# Altium schematic symbol library clusterhead.SchLib: 48 symbols
Pins are listed as number, name and electrical type; pins without a type are passive.

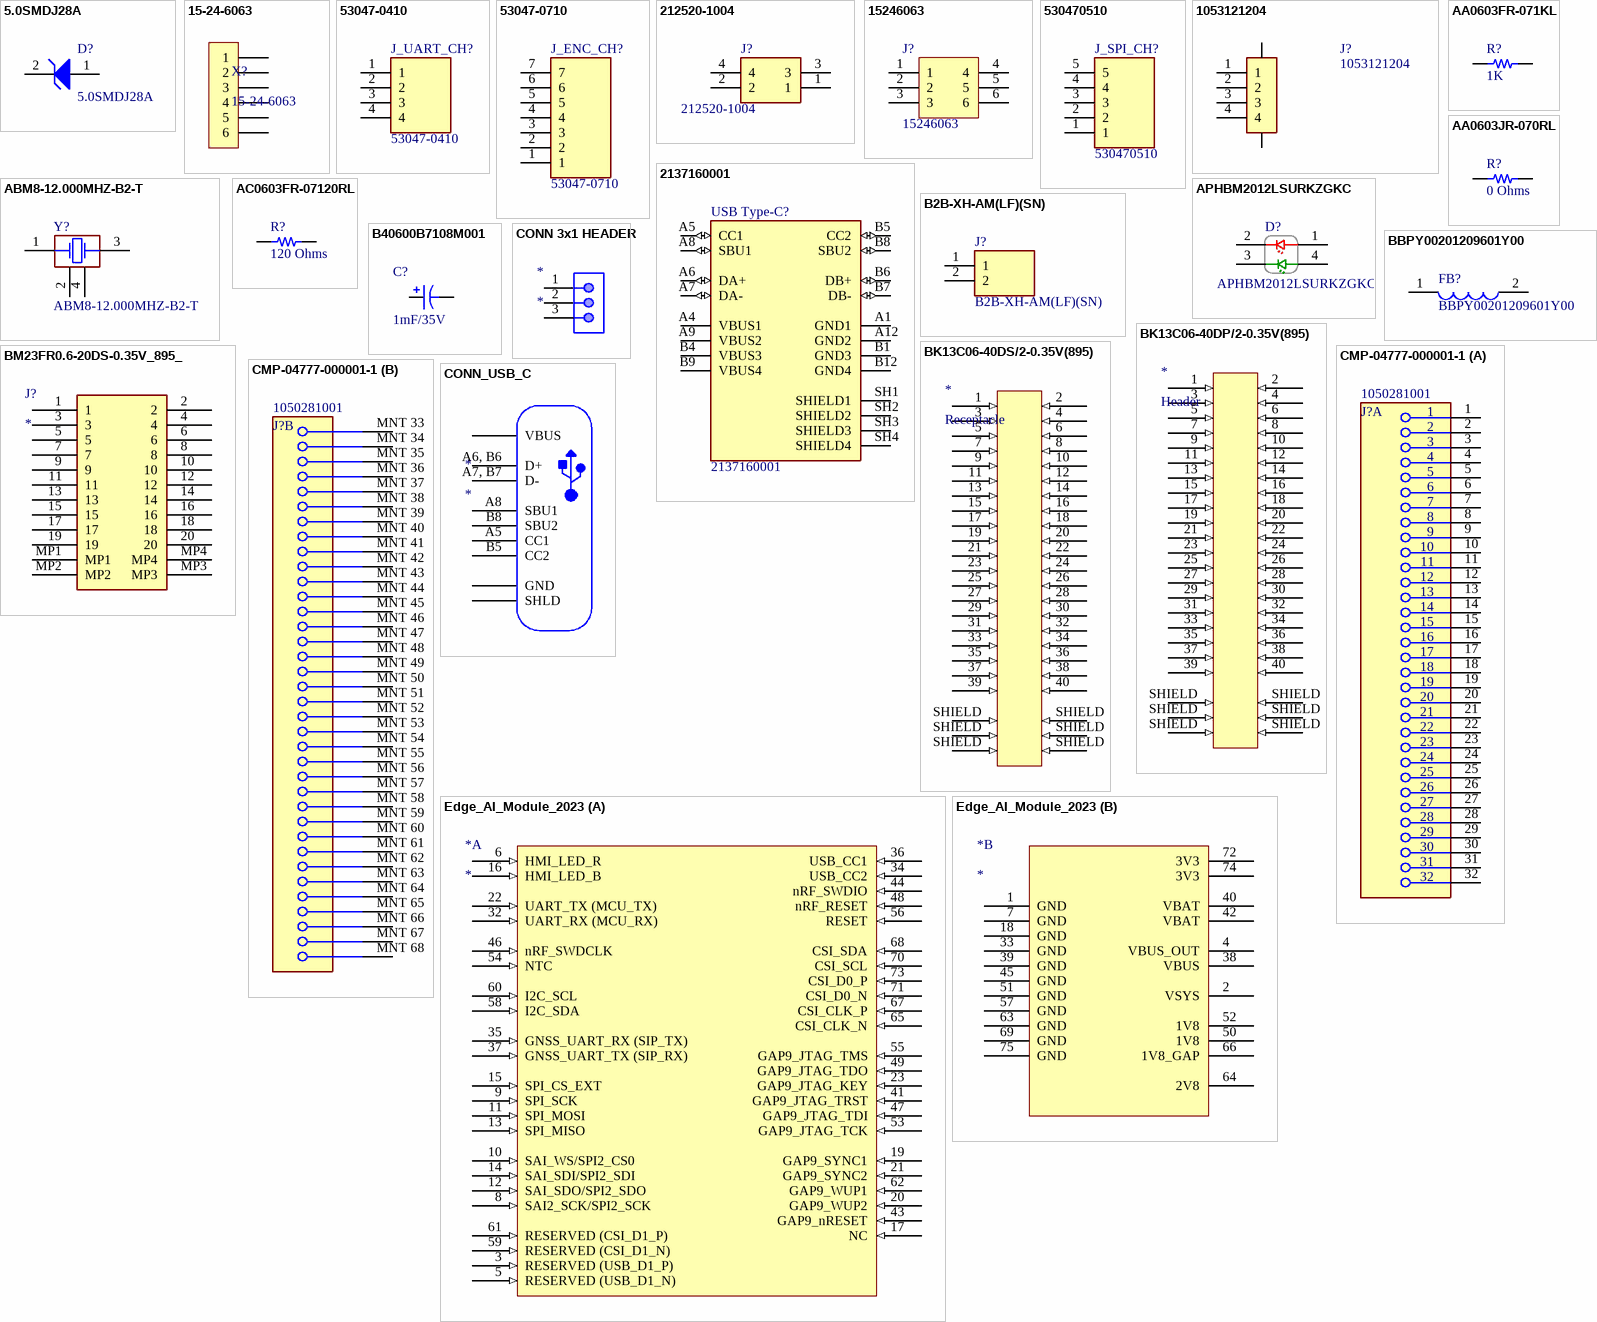
[diagram p0: symbols 5.0SMDJ28A to Edge_AI_Module_2023]

## 5.0SMDJ28A
designator D?
5.0SMDJ Series 5 kW 28 V Uni-Directional Surface Mount TVS Diode - DO-214AB; Manufacturer: Littelfuse; ComponentLink1URL: https://datasheet.ciiva.com/15143/getdatasheetpartid-185167-15143888.pdf?src-supplier=Verical; ComponentLink1Description: https://datasheet.ciiva.com/15143/getdatasheetpartid-185167-15143888.pdf?src-supplier=Verical; ComponentLink2URL: https://datasheet.ciiva.com/332/littelfuse-tvs-diode-5-0smdj-datasheet-pdf-332914.pdf?src-supplier=Digikey; ComponentLink2Description: https://datasheet.ciiva.com/332/littelfuse-tvs-diode-5-0smdj-datasheet-pdf-332914.pdf?src-supplier=Digikey; ComponentLink3URL: https://datasheet.ciiva.com/332/littelfuse-tvs-diode-5-0smdj-datasheet-pdf-332915.pdf?src-supplier=Digikey; ComponentLink3Description: https://datasheet.ciiva.com/332/littelfuse-tvs-diode-5-0smdj-datasheet-pdf-332915.pdf?src-supplier=Digikey; ComponentLink4URL: https://datasheet.ciiva.com/332/littelfuse-tvs-diode-5-0smdj-datasheet-pdf-332916.pdf?src-supplier=Digikey; ComponentLink4Description: https://datasheet.ciiva.com/332/littelfuse-tvs-diode-5-0smdj-datasheet-pdf-332916.pdf?src-supplier=Digikey; Supplier: Digikey; Supplier Part Number: 5.0SMDJ28ADKR-ND; Manufacturer Part Number: 5.0SMDJ28A; RoHS: Yes; Category: TVS Diodes; Stock: 6790; Pricing: 1=1.65, 10=1.37, 100=1.0902, 500=0.92246, 1000=0.78269 (USD)
footprint DO-214AB,SMC (DO-214AB)
pins: 1 A, 2 K

## 15-24-6063
designator X?
Conn Power HDR 6 POS 4.2mm Solder RA Thru-Hole 6 Terminal 1 Port Mini-Fit® BMI Frame; Manufacturer: Molex; Supplier: Digikey; Supplier Part Number: WM13414-ND; Manufacturer Part Number: 15-24-6063; RoHS: Yes; Category: Headers and Wire Housings; Stock: 3777; Pricing: 1=3.1, 10=2.728, 100=2.17, 2720=1.67397, 5440=1.61197 (USD); ComponentLink1URL: https://datasheet.ciiva.com/6814/015246180-sd-6814098.pdf?src-supplier=Digikey; ComponentLink1Description: https://datasheet.ciiva.com/6814/015246180-sd-6814098.pdf?src-supplier=Digikey; ComponentLink2URL: https://datasheet.ciiva.com/36533/88630015246063-pcb-headers-36533167.pdf?src-supplier=Onlinecomponents.com; ComponentLink2Description: https://datasheet.ciiva.com/36533/88630015246063-pcb-headers-36533167.pdf?src-supplier=Onlinecomponents.com; ComponentLink3URL: https://datasheet.ciiva.com/3117/0015246063-pcb-headers-3117083.pdf?src-supplier=Avnet; ComponentLink3Description: https://datasheet.ciiva.com/3117/0015246063-pcb-headers-3117083.pdf?src-supplier=Avnet
footprint MOLEX_15246063
pins: 1, 2, 3, 4, 5, 6

## 53047-0410
designator J_UART_CH?
Connector; Manufacturer_Name: Molex; Datasheet Link: https://www.molex.com/pdm_docs/sd/530470410_sd.pdf; Height: 4.4mm; Manufacturer_Part_Number: 53047-0410; Mouser Part Number: 538-53047-0410; Mouser Price/Stock: https://www.mouser.co.uk/ProductDetail/Molex/53047-0410?qs=DcEdecHHM4i8IPBxVAuJtg%3D%3D
footprint 530470410
pins: 1, 2, 3, 4

## 53047-0710
designator J_ENC_CH?
Connector; Manufacturer_Name: Molex; Datasheet Link: https://componentsearchengine.com/Datasheets/2/53047-0710.pdf; Height: 4.4mm; Manufacturer_Part_Number: 53047-0710; Mouser Part Number: 538-53047-0710; Mouser Price/Stock: https://www.mouser.co.uk/ProductDetail/Molex/53047-0710?qs=359VwiUTsp369M2ojInejw%3D%3D
footprint 530470710
pins: 1, 2, 3, 4, 5, 6, 7

## 212520-1004
designator J?
Mini-Fit Max Vertical Header, Dual Row, 4 Circuits, Tin (Sn) Plating, Black; Manufacturer_Name: Molex; Geometry.Height: 13.85mm; Mouser Part Number: 538-212520-1004; Mouser Price/Stock: https://www.mouser.co.uk/ProductDetail/Molex/212520-1004?qs=pUKx8fyJudAc%252BYvk34kRZQ%3D%3D; Manufacturer_Part_Number: 212520-1004; Datasheet Link: https://www.molex.com/pdm_docs/sd/2125201006_sd.pdf; ClassName: DirectConnect
footprint 2125201004
pins: 1, 2, 3, 4

## 15246063
designator J?
Conn Power HDR 6 POS 4.2mm Solder RA Thru-Hole 6 Terminal 1 Port Mini-Fit® BMI Frame; Manufacturer: Molex; Supplier: Digikey; Supplier Part Number: WM13414-ND; Manufacturer Part Number: 15-24-6063; RoHS: Yes; Category: Headers and Wire Housings; Stock: 3219; Pricing: 1=2.18, 10=1.918, 100=1.5346 (USD); ComponentLink1URL: https://datasheet.ciiva.com/6814/015246180-sd-6814098.pdf?src-supplier=Digikey; ComponentLink1Description: https://datasheet.ciiva.com/6814/015246180-sd-6814098.pdf?src-supplier=Digikey; ComponentLink2URL: https://datasheet.ciiva.com/36533/88630015246063-pcb-headers-36533167.pdf?src-supplier=Onlinecomponents.com; ComponentLink2Description: https://datasheet.ciiva.com/36533/88630015246063-pcb-headers-36533167.pdf?src-supplier=Onlinecomponents.com; ComponentLink3URL: https://datasheet.ciiva.com/3117/0015246063-pcb-headers-3117083.pdf?src-supplier=Avnet; ComponentLink3Description: https://datasheet.ciiva.com/3117/0015246063-pcb-headers-3117083.pdf?src-supplier=Avnet
footprint MOLEX_15246063
pins: 1, 2, 3, 4, 5, 6

## 530470510
designator J_SPI_CH?
Connector; Manufacturer_Name: Molex; Datasheet Link: https://www.molex.com/pdm_docs/sd/530470210_sd.pdf; Height: 4.2mm; Manufacturer_Part_Number: 530470510; Arrow Part Number: 530470510; Arrow Price/Stock: https://www.arrow.com/en/products/53047-0510/molex?region=nac
footprint 530470510
pins: 1, 2, 3, 4, 5

## 1053121204
designator J?
Connector; Manufacturer: Molex; Datasheet Link: https://www.molex.com/pdm_docs/sd/1053121104_sd.pdf; Height: 10.51mm; Manufacturer Part Number: 1053121204
footprint 1053121204
pins: 1, 2, 3, 4, P1, P2

## 2137160001
designator USB Type-C?
USB-C (USB TYPE-C) USB 2.0 Receptacle Connector 24 (16+8 Dummy) Position Through Hole, Right Angle; MF: Molex; SnapEDA_Link: https://www.snapeda.com/parts/2137160001/Molex/view-part/?ref=snap; Package: None; Value: *; MP: 2137160001; Check_prices: https://www.snapeda.com/parts/2137160001/Molex/view-part/?ref=eda
footprint MOLEX_2137160001
pins: A1 GND1 (power), A4 VBUS1 (power), A5 CC1 (io), A6 DA+ (io), A7 DA- (io), A8 SBU1 (io), A9 VBUS2 (power), A12 GND2 (power), B1 GND3 (power), B4 VBUS3 (power), B5 CC2 (io), B6 DB+ (io), B7 DB- (io), B8 SBU2 (io), B9 VBUS4 (power), B12 GND4 (power), SH1 SHIELD1, SH2 SHIELD2, SH3 SHIELD3, SH4 SHIELD4

## AA0603FR-071KL
designator R?, comment 1K
RES SMD 1K OHM 1% 1/10W 0603; Part Number: AA0603FR-071KL; Manufacturer: Yageo; Power (Watts): 0.1W, 1/10W; Resistance: 1 kOhms; Temperature Coefficient: ±150ppm/°C; ComponentLink1Description: Datasheet; ComponentLink1URL: https://www.yageo.com/upload/media/product/productsearch/datasheet/rchip/PYu-AA_51_RoHS_L_3.pdf; ComponentLink2Description: DigiKey Link; ComponentLink2URL: https://www.digikey.com/en/products/detail/yageo/AA0603FR-071KL/5888847; Composition: Thick Film; Device Package: 0603 (1608 Metric); Features: Anti-Sulfur, Automotive AEC-Q200, Moisture Resistant; Height - Seated (Max): 0.022" (0.55mm); LastUpdated: 09/02/2024 20:41:42; Lifecycle Status: Active; Minimum Order: 1; Number of Terminations: 2; Operating Temperature: -55°C ~ 155°C; Package / Case: 0603 (1608 Metric); Packaging: TapeAndReel; PartId: 64335; Part Status: Active; Price: 0.01; Ratings: AEC-Q200; Series: AA; Size / Dimension: 0.063" L x 0.031" W (1.60mm x 0.80mm); Supplier 1: DigiKey; Supplier Part Number 1: 13-AA0603FR-071KLCT-ND; Supplier Device Package: 0603; Tolerance: ±1%; Value: 1K
footprint RES 0603_1608 (Chip Resistor, 2-Leads, Body 1.60x0.80mm, IPC Medium Density)
pins: 1, 2

## AA0603JR-070RL
designator R?, comment 0 Ohms
RES SMD 0 OHM JUMPER 1/10W 0603; Part Number: AA0603JR-070RL; Manufacturer: Yageo; Power (Watts): 0.1W, 1/10W; ComponentLink1Description: Datasheet; ComponentLink1URL: https://www.yageo.com/upload/media/product/productsearch/datasheet/rchip/PYu-AA_51_RoHS_L_3.pdf; ComponentLink2Description: DigiKey Link; ComponentLink2URL: https://www.digikey.com/en/products/detail/yageo/AA0603JR-070RL/5889486; Composition: Thick Film; Device Package: 0603 (1608 Metric); Features: Anti-Sulfur, Automotive AEC-Q200, Moisture Resistant; Height - Seated (Max): 0.022" (0.55mm); LastUpdated: 09/02/2024 20:41:41; Lifecycle Status: Active; Minimum Order: 1; Number of Terminations: 2; Operating Temperature: -55°C ~ 155°C; Package / Case: 0603 (1608 Metric); Packaging: TapeAndReel; PartId: 64274; Part Status: Active; Price: 0.01; Ratings: AEC-Q200; Resistance: 0 Ohms; Series: AA; Size / Dimension: 0.063" L x 0.031" W (1.60mm x 0.80mm); Supplier 1: DigiKey; Supplier Part Number 1: 13-AA0603JR-070RLCT-ND; Supplier Device Package: 0603; Tolerance: Jumper; Value: 0 Ohms
footprint RES 0603_1608 (Chip Resistor, 2-Leads, Body 1.60x0.80mm, IPC Medium Density)
pins: 1, 2

## ABM8-12.000MHZ-B2-T
designator Y?
Crystal or Oscillator; Manufacturer_Name: ABRACON; Datasheet Link: https://abracon.com/Resonators/abm8.pdf; Height: 0.8mm; Manufacturer_Part_Number: ABM8-12.000MHZ-B2-T; Mouser Part Number: 815-ABM8-12-B2-T; Mouser Price/Stock: https://www.mouser.co.uk/ProductDetail/ABRACON/ABM8-12.000MHZ-B2-T?qs=hjiqo2PPvpiyy6%252BNWm3IZg%3D%3D; Arrow Part Number: ABM8-12.000MHZ-B2-T; Arrow Price/Stock: https://www.arrow.com/en/products/abm8-12.000mhz-b2-t/abracon?region=nac
footprint ABM810000MHZ12D2W
pins: 1 XTAL_1, 2 GND_1, 3 XTAL_2, 4 GND_2

## AC0603FR-07120RL
designator R?, comment 120 Ohms
RES SMD 120 OHM 1% 1/10W 0603; Part Number: AC0603FR-07120RL; Manufacturer: Yageo; Power (Watts): 0.1W, 1/10W; Temperature Coefficient: ±100ppm/°C; ComponentLink1Description: Datasheet; ComponentLink1URL: https://www.yageo.com/upload/media/product/productsearch/datasheet/rchip/PYu-AC_51_RoHS_L_7.pdf; ComponentLink2Description: DigiKey Link; ComponentLink2URL: https://www.digikey.com/en/products/detail/yageo/AC0603FR-07120RL/5895761; Composition: Thick Film; Device Package: 0603 (1608 Metric); Features: Automotive AEC-Q200, Moisture Resistant; Height - Seated (Max): 0.022" (0.55mm); LastUpdated: 09/02/2024 20:42:47; Lifecycle Status: Active; Minimum Order: 1; Number of Terminations: 2; Operating Temperature: -55°C ~ 155°C; Package / Case: 0603 (1608 Metric); Packaging: CutTape; PartId: 17447; Part Status: Active; Price: 0.01; Ratings: AEC-Q200; Resistance: 120 Ohms; Series: AC; Size / Dimension: 0.063" L x 0.031" W (1.60mm x 0.80mm); Supplier 1: DigiKey; Supplier Part Number 1: YAG3563CT-ND; Supplier Device Package: 0603; Tolerance: ±1%; Value: 120 Ohms
footprint RES 0603_1608
pins: 1, 2

## APHBM2012LSURKZGKC
designator D?
LED; Manufacturer_Name: Kingbright; Datasheet Link: http://www.kingbrightusa.com/images/catalog/SPEC/APHBM2012LSURKZGKC.pdf; Manufacturer_Part_Number: APHBM2012LSURKZGKC; Mouser Part Number: 604-APHBM2012LSURKZG; Mouser Price/Stock: https://www.mouser.co.uk/ProductDetail/Kingbright/APHBM2012LSURKZGKC?qs=ZqXcJfGlKsiK10t3sE%252BJSA%3D%3D; Arrow Part Number: APHBM2012LSURKZGKC; Arrow Price/Stock: https://www.arrow.com/en/products/aphbm2012lsurkzgkc/kingbright?region=nac
footprint KPHBM2012QBDCGKC
pins: 1 A_RED, 2 K_RED, 3 K_GREEN, 4 A_GREEN

## B2B-XH-AM(LF)(SN)
designator J?
Connector; Manufacture: JST; Datasheet Link: https://www.jst-mfg.com/product/pdf/eng/eXH.pdf; Height: 7mm; Manufacturer Part Number: B2B-XH-AM(LF)(SN); Arrow Part Number: B2B-XH-AM(LF)(SN); Arrow Price/Stock: https://www.arrow.com/en/products/b2b-xh-am-lf-sn/jst-manufacturing?region=europe
footprint B2BXHAMLFSN
pins: 1, 2

## B40600B7108M001
designator C?, comment 1mF/35V
Hybrid Polymer Capacitors, 1000µF/35V DC, 16mm dia x 25mm length; Manufacturer: TDK EPCOS; MP: B40600B7108M001; Value: 1000uF; MF: EPCOS - TDK Electronics; SnapEDA_Link: https://www.snapeda.com/parts/B40600B7108M001/TDK/view-part/?ref=snap; Purchase-URL: https://pricing.snapeda.com/search/part/B40600B7108M001/?ref=eda; Check_prices: https://www.snapeda.com/parts/B40600B7108M001/TDK/view-part/?ref=eda; Digi-Key_Part_Number: 495-B40600B7108M001-ND; Package: AXIAL-2 TDK; Supplier: Digikey; Supplier Part Number: 495-B40600B7108M001-ND; Manufacturer Part Number: B40600B7108M001; RoHS: Yes; Category: Polymer Capacitors; Stock: 816; Pricing: 1=5.06, 10=4.354, 50=3.9488, 180=3.26022, 540=2.835, 1080=2.8125 (USD); Length: 25mm
footprint CAP_B40600B7108M001
pins: N, P

## BBPY00201209601Y00
designator FB?
Ferrite Bead; Manufacturer_Name: Pulse Electronics; Datasheet Link: https://www.yageo.com/upload/media/product/productsearch/datasheet/inductor/BBPY_Series.pdf; Height: 1.1mm; Manufacturer_Part_Number: BBPY00201209601Y00; Mouser Part Number: 603-BBPY201209601Y00; Mouser Price/Stock: https://www.mouser.co.uk/ProductDetail/Pulse-Electronics/BBPY00201209601Y00?qs=DRkmTr78QATKA%252B4%252B6OXqRw%3D%3D
footprint BEADC2012X110N
pins: 1, 2

## BK13C06-40DP/2-0.35V(895)
designator *, comment Header
footprint BK13C06-40DP/2-0.35V(895)
pins: 1 (in), 2 (in), 3 (in), 4 (in), 5 (in), 6 (in), 7 (in), 8 (in), 9 (in), 10 (in), 11 (in), 12 (in), 13 (in), 14 (in), 15 (in), 16 (in), 17 (in), 18 (in), 19 (in), 20 (in), 21 (in), 22 (in), 23 (in), 24 (in), 25 (in), 26 (in), 27 (in), 28 (in), 29 (in), 30 (in), 31 (in), 32 (in), 33 (in), 34 (in), 35 (in), 36 (in), 37 (in), 38 (in), 39 (in), 40 (in), SHIELD (in), SHIELD (in), SHIELD (in), SHIELD (in), SHIELD (in), SHIELD (in)

## BK13C06-40DS/2-0.35V(895)
designator *, comment Receptacle
footprint BK13C06-40DS/2-0.35V(895)
pins: 1 (in), 2 (in), 3 (in), 4 (in), 5 (in), 6 (in), 7 (in), 8 (in), 9 (in), 10 (in), 11 (in), 12 (in), 13 (in), 14 (in), 15 (in), 16 (in), 17 (in), 18 (in), 19 (in), 20 (in), 21 (in), 22 (in), 23 (in), 24 (in), 25 (in), 26 (in), 27 (in), 28 (in), 29 (in), 30 (in), 31 (in), 32 (in), 33 (in), 34 (in), 35 (in), 36 (in), 37 (in), 38 (in), 39 (in), 40 (in), SHIELD (in), SHIELD (in), SHIELD (in), SHIELD (in), SHIELD (in), SHIELD (in)

## BM23FR0.6-20DS-0.35V_895_
designator J?
Connector; Manufacturer_Name: Hirose; Manufacturer_Part_Number: BM23FR0.6-20DS-0.35V(895); Datasheet Link: https://componentsearchengine.com/Datasheets/1/BM23FR0.6-20DS-0.35V(895).pdf; Height: 0.6mm; Mouser Part Number: 798-3FR0620DS035V895; Mouser Price/Stock: https://www.mouser.co.uk/ProductDetail/Hirose-Connector/BM23FR0.6-20DS-0.35V895?qs=YCa%2FAAYMW03JJxY7hzXNzQ%3D%3D
footprint BM23FR0620DS035V895
pins: 1, 2, 3, 4, 5, 6, 7, 8, 9, 10, 11, 12, 13, 14, 15, 16, 17, 18, 19, 20, MP1, MP2, MP3, MP4

## CMP-04777-000001-1
designator J?, comment 1050281001
CONN CAM SOCKET 32POS GOLD; Manufacturer: Molex; Voltage Rating: 50V; Pitch: 0.9mm; Conn Orientation: Top View; Conn Gender: Female; Is Female: yes; Number Of Contacts: 32; Current Rating: 0.5A; Temperature Range High: +85°C; Lead Free: Yes; Digikey Description: CONN CAM SOCKET 32POS GOLD; Octopart: https://octopart.com/105028-1001-molex-19914268; Device Class L2: IC and Component Sockets; Device Class L3: unset; Temperature Range Low: -55°C; Manufacturer Part Number: 1050281001; Height: 4.35mm; Automotive: No; Temperature: -55°C to +85°C; Device Class L1: Connectors; Category: Conn; ComponentLink2Description: Datasheet; ComponentLink2URL: https://www.molex.com/pdm_docs/sd/1050281001_sd.pdf; Package: 0; Contact Material: Gold; RoHS: TRUE
footprint FP-1050281001-MFG
part A pins: 1, 2, 3, 4, 5, 6, 7, 8, 9, 10, 11, 12, 13, 14, 15, 16, 17, 18, 19, 20, 21, 22, 23, 24, 25, 26, 27, 28, 29, 30, 31, 32
part B pins: MNT 33 MNT 1, MNT 34 MNT 35, MNT 35, MNT 36, MNT 37, MNT 38, MNT 39, MNT 40, MNT 41, MNT 42, MNT 43, MNT 44, MNT 45, MNT 46, MNT 47, MNT 48, MNT 49, MNT 50, MNT 51, MNT 52, MNT 53, MNT 54, MNT 55, MNT 56, MNT 57, MNT 58, MNT 59, MNT 60, MNT 61, MNT 62, MNT 63, MNT 64, MNT 65, MNT 66, MNT 67, MNT 68

## CONN 3x1 HEADER
designator *
footprint HDRV3W97P0X254_1X3_721X234X821P
pins: 1, 2, 3

## CONN_USB_C
designator *
footprint CONN_USBC_2137160001 (USB 2.0 Type C connector)
pins: 0 SHLD, A1 GND, A4 VBUS, A5 CC1, A6, B6 D+, A7, B7 D-, A8 SBU1, B5 CC2, B8 SBU2

## Edge_AI_Module_2023
designator *
footprint AI_Node_Connector
part A pins: 3 RESERVED (USB_D1_P) (in), 5 RESERVED (USB_D1_N) (in), 6 HMI_LED_R (in), 8 SAI2_SCK/SPI2_SCK (in), 9 SPI_SCK (in), 10 SAI_WS/SPI2_CS0 (in), 11 SPI_MOSI (in), 12 SAI_SDO/SPI2_SDO (in), 13 SPI_MISO (in), 14 SAI_SDI/SPI2_SDI (in), 15 SPI_CS_EXT (in), 16 HMI_LED_B (in), 17 NC (in), 19 GAP9_SYNC1 (in), 20 GAP9_WUP2 (in), 21 GAP9_SYNC2 (in), 22 UART_TX (MCU_TX) (in), 23 GAP9_JTAG_KEY (in), 32 UART_RX (MCU_RX) (in), 34 USB_CC2 (in), 35 GNSS_UART_RX (SIP_TX) (in), 36 USB_CC1 (in), 37 GNSS_UART_TX (SIP_RX) (in), 41 GAP9_JTAG_TRST (in), 43 GAP9_nRESET (in), 44 nRF_SWDIO (in), 46 nRF_SWDCLK (in), 47 GAP9_JTAG_TDI (in), 48 nRF_RESET (in), 49 GAP9_JTAG_TDO (in), 53 GAP9_JTAG_TCK (in), 54 NTC (in), 55 GAP9_JTAG_TMS (in), 56 RESET (in), 58 I2C_SDA (in), 59 RESERVED (CSI_D1_N) (in), 60 I2C_SCL (in), 61 RESERVED (CSI_D1_P) (in), 62 GAP9_WUP1 (in), 65 CSI_CLK_N (in), 67 CSI_CLK_P (in), 68 CSI_SDA (in), 70 CSI_SCL (in), 71 CSI_D0_N (in), 73 CSI_D0_P (in)
part B pins: 1 GND (power), 2 VSYS (power), 4 VBUS_OUT (power), 7 GND (power), 18 GND (power), 33 GND (power), 38 VBUS (power), 39 GND (power), 40 VBAT (power), 42 VBAT (power), 45 GND (power), 50 1V8 (power), 51 GND (power), 52 1V8 (power), 57 GND (power), 63 GND (power), 64 2V8 (power), 66 1V8_GAP (power), 69 GND (power), 72 3V3 (power), 74 3V3 (power), 75 GND (power)

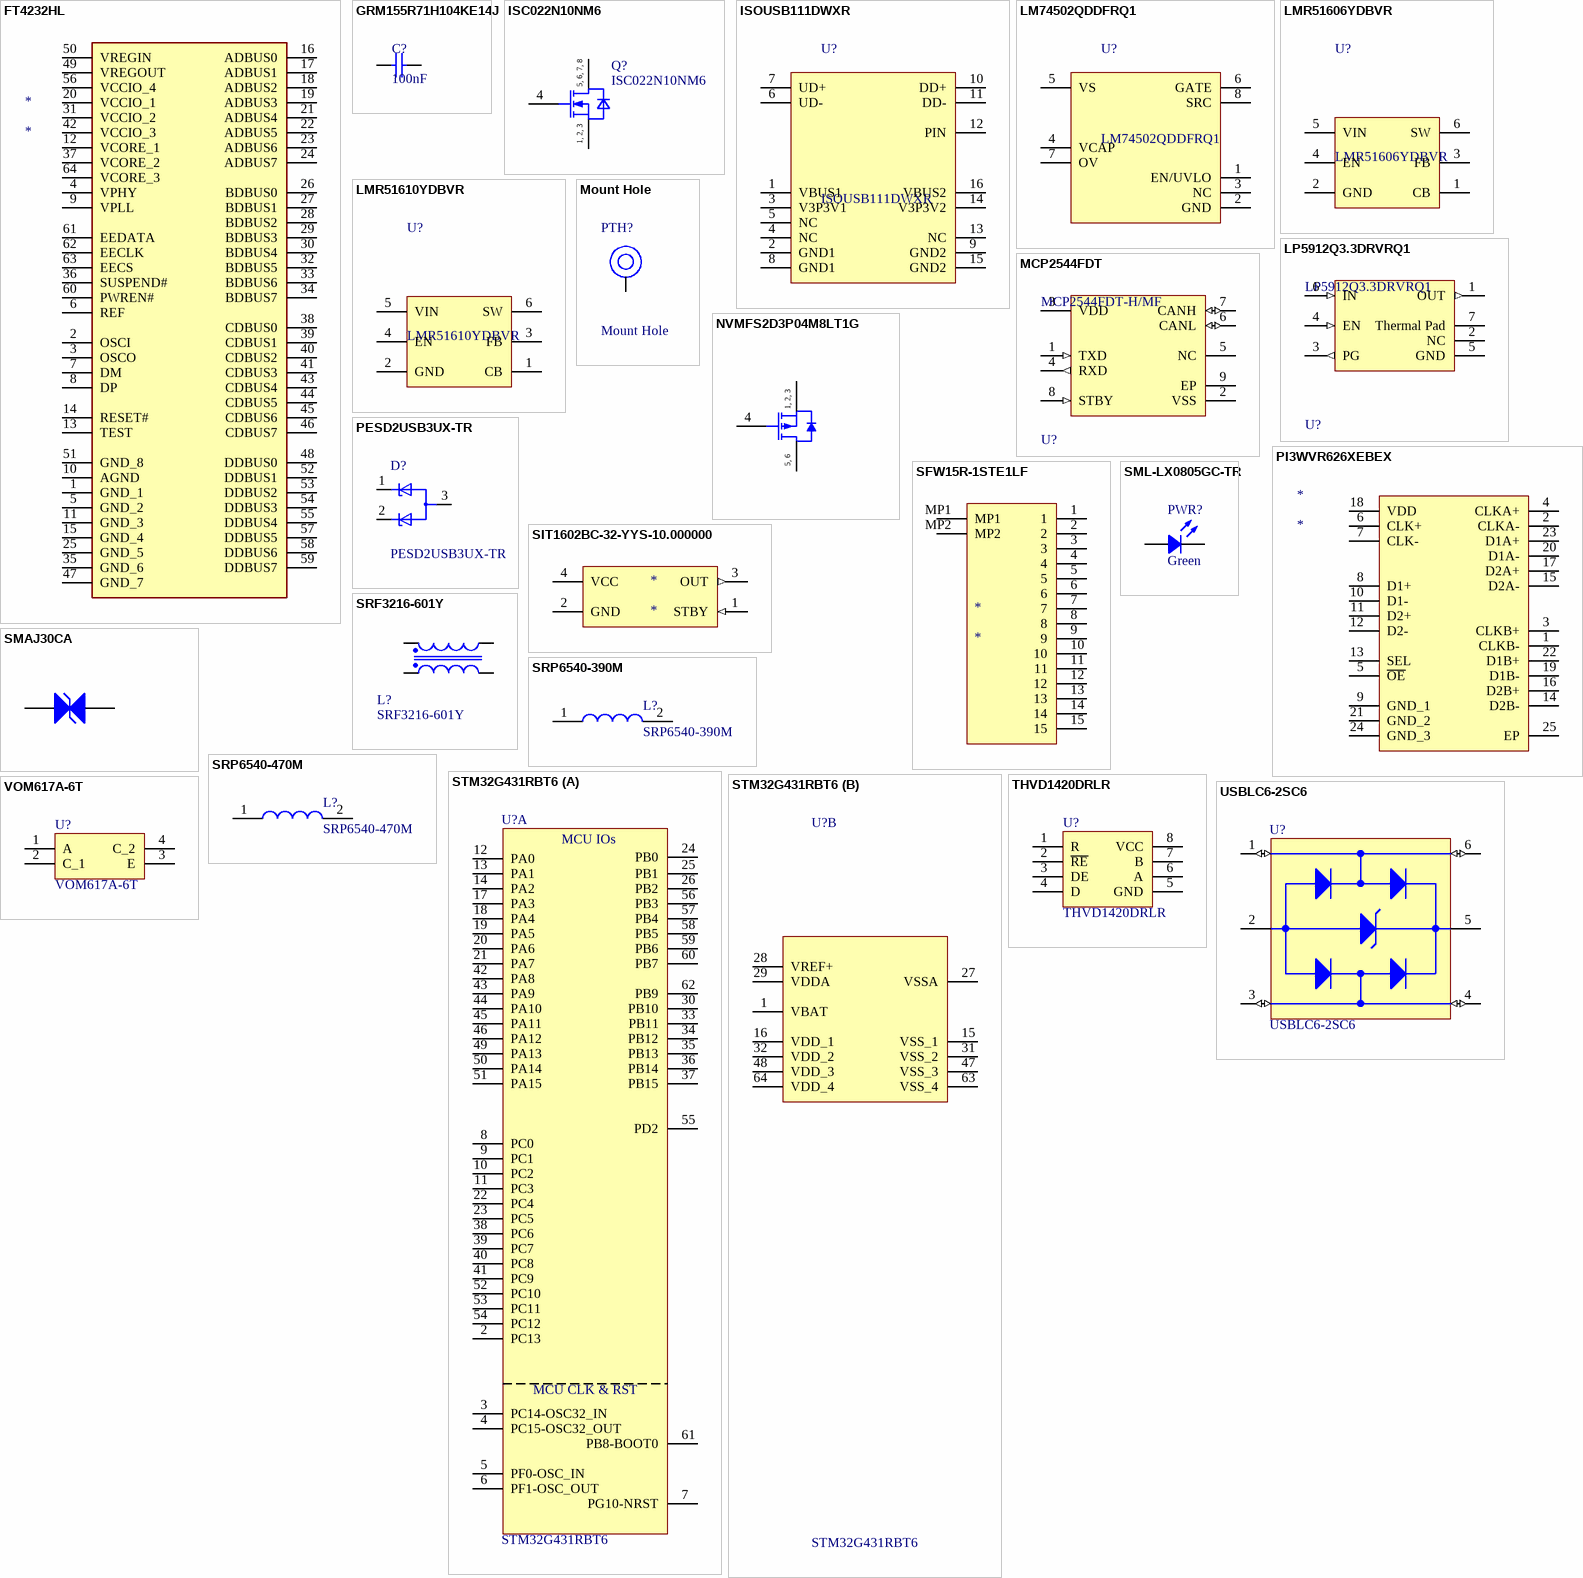
[diagram p1: symbols FT4232HL to VOM617A-6T]

## FT4232HL
designator *
footprint QFP50P1200X1200X160-64N
pins: 1 GND_1, 2 OSCI, 3 OSCO, 4 VPHY, 5 GND_2, 6 REF, 7 DM, 8 DP, 9 VPLL, 10 AGND, 11 GND_3, 12 VCORE_1, 13 TEST, 14 RESET#, 15 GND_4, 16 ADBUS0, 17 ADBUS1, 18 ADBUS2, 19 ADBUS3, 20 VCCIO_1, 21 ADBUS4, 22 ADBUS5, 23 ADBUS6, 24 ADBUS7, 25 GND_5, 26 BDBUS0, 27 BDBUS1, 28 BDBUS2, 29 BDBUS3, 30 BDBUS4, 31 VCCIO_2, 32 BDBUS5, 33 BDBUS6, 34 BDBUS7, 35 GND_6, 36 SUSPEND#, 37 VCORE_2, 38 CDBUS0, 39 CDBUS1, 40 CDBUS2, 41 CDBUS3, 42 VCCIO_3, 43 CDBUS4, 44 CDBUS5, 45 CDBUS6, 46 CDBUS7, 47 GND_7, 48 DDBUS0, 49 VREGOUT, 50 VREGIN, 51 GND_8, 52 DDBUS1, 53 DDBUS2, 54 DDBUS3, 55 DDBUS4, 56 VCCIO_4, 57 DDBUS5, 58 DDBUS6, 59 DDBUS7, 60 PWREN#, 61 EEDATA, 62 EECLK, 63 EECS, 64 VCORE_3

## GRM155R71H104KE14J
designator C?, comment 100nF
0402 0.1 uF 50 V ±10% Tolerance X7R SMT Multilayer Ceramic Capacitor; Manufacturer: Murata; Manufacturer Part Number: GRM155R71H104KE14J; Voltage Rating (DC): 50V; Supplier 1: Digi-Key; RoHS: Yes; Category: Ceramic Capacitors; Stock 1: 1916144; Pricing 1: 1=0.10000, 10=0.03800, 100=0.01680, 500=0.01198, 1000=0.00941, 2500=0.00855, 5000=0.00787 (USD); Mount: Surface Mount; Case/Package: 0402; Weight: 0.000212oz; Case Code (Imperial): 0402; Case Code (Metric): 1005; Min Operating Temperature: -55°C; Max Operating Temperature: 125°C; Tolerance: 10%; Dielectric: X7R; Termination: SMD/SMT; Composition: Ceramic; Package Quantity: 50000; Packaging: Tape and Reel; Value: 100nF; Voltage Rating: 50V; Length: 0.039inch; Height: 0.5mm; Width: 0.5mm; Thickness: 0.022inch; Lead Free: Lead Free; ComponentLink1URL: http://search.murata.co.jp/Ceramy/image/img/A01X/G101/ENG/GRM155R71H104KE14-01.pdf?src-supplier=Mouser; ComponentLink1Description: http://search.murata.co.jp/Ceramy/image/img/A01X/G101/ENG/GRM155R71H104KE14-01.pdf?src-supplier=Mouser; ComponentLink2URL: http://search.murata.co.jp/Ceramy/image/img/A01X/G101/ENG/GRM155R71H104KE14-01.pdf?src-supplier=Digi-Key; ComponentLink2Description: http://search.murata.co.jp/Ceramy/image/img/A01X/G101/ENG/GRM155R71H104KE14-01.pdf?src-supplier=Digi-Key; ComponentLink3URL: http://search.murata.co.jp/Ceramy/image/img/A01X/G101/ENG/GRM155R71H104KE14-01.pdf?src-supplier=Avnet; ComponentLink3Description: http://search.murata.co.jp/Ceramy/image/img/A01X/G101/ENG/GRM155R71H104KE14-01.pdf?src-supplier=Avnet; ComponentLink4URL: http://search.murata.co.jp/Ceramy/image/img/A01X/G101/ENG/GRM155R71H104KE14-01.pdf?src-supplier=Avnet+Europe; ComponentLink4Description: http://search.murata.co.jp/Ceramy/image/img/A01X/G101/ENG/GRM155R71H104KE14-01.pdf?src-supplier=Avnet+Europe; Supplier Part Number 1: 490-13342-1-ND
footprint CAPC1005X55X25LL05T10 (Chip Capacitor, 2-Leads, Body 1.00x0.50mm, IPC High Density)
footprint CAPC1005X55X25ML05T10 (Chip Capacitor, 2-Leads, Body 1.00x0.50mm, IPC Low Density)
footprint CAPC1005X55X25NL05T10 (Chip Capacitor, 2-Leads, Body 1.00x0.50mm, IPC Medium Density)
pins: 1, 2

## ISC022N10NM6
designator Q?
Insulated-Gate Field-Effect Transistor (IGFET), N-Channel, Enhancement, Body Diode, Pin 1 Source, 2 Source, 3 Source, 4 Gate, 5 Drain, 6 Drain, 7 Drain, 8 Drain, 8 Pins; Manufacturer: Infineon Technologies; Manufacturer Order Number: ISC022N10NM6; PackageReference: PG-TSON-8-3; ClassName: DirectConnect
footprint IFX-PG-TSON-8-3-1-V1 (Transistor; 1.27mm pitch, 8 pin, 6.00mm L X 5.00mm W X 1.1mm H body)
pins: 1 SOURCE, 2 SOURCE, 3 SOURCE, 4 GATE, 5 DRAIN, 6 DRAIN, 7 DRAIN, 8 DRAIN
text: 5, 6, 7, 8; 1, 2, 3

## ISOUSB111DWXR
designator U?
Low emissions, full and low speed isolated USB repeater 16-SSOP -40 to 125; Manufacturer: Texas Instruments; Supplier: Digikey; Supplier Part Number: 296-ISOUSB111DWXRCT-ND; Manufacturer Part Number: ISOUSB111DWXR; RoHS: No; Stock: 317; Pricing: 1=10.29, 10=9.294, 25=8.8616, 100=7.6946, 250=7.34876, 500=6.70034 (USD)
footprint DWX0016A (SOP, 16-Leads, Body 5.6x6.5mm, Pitch 0.65mm, IPC Low Density)
pins: 1 VBUS1, 2 GND1, 3 V3P3V1, 4 NC, 5 NC, 6 UD-, 7 UD+, 8 GND1, 9 GND2, 10 DD+, 11 DD-, 12 PIN, 13 NC, 14 V3P3V2, 15 GND2, 16 VBUS2

## LM74502QDDFRQ1
designator U?
Automotive reverse polarity protection controller, overvoltage protection, gate drive strength 60 μA 8-SOT-23-THIN...; Manufacturer_Name: Texas Instruments; Datasheet Link: https://www.ti.com/lit/gpn/lm74502-q1; Height: 1.1mm; Manufacturer_Part_Number: LM74502QDDFRQ1; Mouser Part Number: 595-LM74502QDDFRQ1; Mouser Price/Stock: https://www.mouser.co.uk/ProductDetail/Texas-Instruments/LM74502QDDFRQ1?qs=t7xnP681wgUL5Js0bhGeCA%3D%3D; Arrow Part Number: LM74502QDDFRQ1; Arrow Price/Stock: https://www.arrow.com/en/products/lm74502qddfrq1/texas-instruments?region=nac; Supplier: Digikey; Supplier Part Number: 296-LM74502QDDFRQ1CT-ND; Manufacturer: Texas Instruments; Manufacturer Part Number: LM74502QDDFRQ1; RoHS: No; Category: Integrated Circuits (ICs); Stock: 2376; Pricing: 1=1.95, 10=1.755, 25=1.656, 100=1.4108, 250=1.32464, 500=1.15908, 1000=0.96038 (USD)
footprint SOT65P280X110-8N
pins: 1 EN/UVLO, 2 GND, 3 NC, 4 VCAP, 5 VS, 6 GATE, 7 OV, 8 SRC

## LMR51606YDBVR
designator U?
Integrated Circuit; Manufacturer: Texas Instruments; Supplier: Digikey; Supplier Part Number: 296-LMR51606YDBVRCT-ND; Manufacturer Part Number: LMR51606YDBVR; RoHS: No; Stock: 1648; Pricing: 1=1.07, 10=0.953, 25=0.9048, 100=0.7434, 250=0.69488, 500=0.61408, 1000=0.4848 (USD); Case/Package: SOT-23; Pins: 6; Length: 2.9mm; Width: 1.6mm; Thickness: 1.2mm; Supplier 1: Digikey; Supplier Part Number 1: 296-LMR51606YDBVRCT-ND
footprint FP-DBV0006A-MFG
footprint FP-DBV0006A-IPC_C
footprint FP-DBV0006A-IPC_B
footprint FP-DBV0006A-IPC_A
pins: 1 CB, 2 GND, 3 FB, 4 EN, 5 VIN, 6 SW

## LMR51610YDBVR
designator U?
Integrated Circuit; Manufacturer: Texas Instruments; Manufacturer Part Number: LMR51610YDBVR; RoHS: No; Case/Package: SOT-23; Pins: 6; Length: 2.9mm; Width: 1.6mm; Thickness: 1.2mm; Supplier 1: Mouser; Supplier Part Number 1: 595-LMR51610YDBVR; Supplier 2: Digikey; Supplier Part Number 2: 296-LMR51610YDBVRCT-ND; Supplier 3: Digikey; Supplier Part Number 3: 296-LMR51610YDBVRDKR-ND
footprint FP-DBV0006A-MFG
footprint FP-DBV0006A-IPC_C
footprint FP-DBV0006A-IPC_B
footprint FP-DBV0006A-IPC_A
pins: 1 CB, 2 GND, 3 FB, 4 EN, 5 VIN, 6 SW

## LP5912Q3.3DRVRQ1
designator U?
LDO Regulator Pos 3.3V 0.5A Automotive 6-Pin WSON EP T/R; Manufacturer: Texas Instruments; Number Of Outputs: 1; Max Junction Temp: +125°C; Output Type: Fixed; Nominal Supply Current: 30-400uA; Output Current: 500mA; Max Supply Voltage: 6.5V; Accuracy Percentage: 3%; Dropout Voltage: 170mV; Standoff Height: 0mm; Min Supply Voltage: 1.6V; Automotive Grade: Grade 1; Quiescent Current: 55uA; Output Configuration: Positive; Max Supply Current: 600uA; Power Supply Rejection Ratio (PSRR): 40dB; ComponentLink2URL: http://www.ti.com/lit/ds/symlink/lp5912-q1.pdf; Manufacturer Part Number: LP5912Q3.3DRVRQ1; Category: IC; Height: 0.8mm; Temperature Range Low: -40°C; Device Class L3: Voltage Regulators - Linear; RoHS: TRUE; Automotive: Yes; Octopart: https://octopart.com/lp5912q3.3drvrq1-texas+instruments-70110974; Digikey Description: IC REG LINEAR 3.3V 500MA 6WSON; ComponentLink2Description: Datasheet; Output Voltage: 3.3V; Device Class L1: Integrated Circuits (ICs); Ambient Temperature Range High: +125°C; Ambient Temperature Range Low: -40°C; Device Class L2: Power Management ICs; Temperature Range High: +125°C; Lead Free: Yes; Package: DRV0006A; Temperature: -40°C to +125°C; Supplier: Digikey; Supplier Part Number: 296-44294-1-ND; Stock: 4440; Pricing: 1=1.41, 10=1.26, 25=1.1956, 100=0.9823, 250=0.9182, 500=0.81142, 1000=0.6406 (USD); Mounting Technology: Surface Mount; Min Operating Temperature: -40°C; Max Operating Temperature: 125°C; Series: Automotive, AEC-Q100; Packaging: Cut Tape; Number of Regulators: 1; Min Output Voltage: 3.3V; ComponentLink1URL: http://www.ti.com/lit/ds/symlink/lp5912-q1.pdf?src-supplier=Digikey; ComponentLink1Description: http://www.ti.com/lit/ds/symlink/lp5912-q1.pdf?src-supplier=Digikey
footprint FP-DRV0006A-IPC_A
footprint FP-DRV0006A-MFG
footprint FP-DRV0006A-IPC_C
footprint FP-DRV0006A-IPC_B
pins: 1 OUT (out), 2 NC, 3 PG (out), 4 EN (in), 5 GND (power), 6 IN (in), 7 Thermal Pad (power)

## MCP2544FDT
designator U?, comment MCP2544FDT-H/MF
CAN Transceiver, 4.5 to 5.5V, 70mA, -40 to 150C, DFN-8, RoHS; Manufacturer: Microchip; Receiver Hysteresis: 200mV; Data Rate: 8Mbps; Case/Package: DFN; Min Operating Temperature: -40°C; Packaging: Cut Tape; Series: -; Max Operating Temperature: 150°C; Mount: Surface Mount; RoHS Compliant: Yes; Supplier: Digikey; Supplier Part Number: MCP2544FDT-H/MFCT-ND; Manufacturer Part Number: MCP2544FDT-H/MF; RoHS: Yes; Category: Interface ICs; Stock: 3300; Pricing: 1=1.11, 25=0.92, 100=0.83 (USD); ComponentLink1URL: http://www.microchip.com/mymicrochip/filehandler.aspx?ddocname=en585412&src-supplier=Digikey; ComponentLink1Description: http://www.microchip.com/mymicrochip/filehandler.aspx?ddocname=en585412&src-supplier=Digikey; ComponentLink2URL: https://datasheet.octopart.com/MCP2544FDT-H-MF-Microchip-datasheet-98403628.pdf?src-supplier=SHENGYU+ELECTRONICS; ComponentLink2Description: https://datasheet.octopart.com/MCP2544FDT-H-MF-Microchip-datasheet-98403628.pdf?src-supplier=SHENGYU+ELECTRONICS
footprint FP-C04-062-IPC_A
footprint FP-C04-062-MFG
footprint FP-C04-062-IPC_C
footprint FP-C04-062-IPC_B
pins: 1 TXD (in), 2 VSS (power), 3 VDD (power), 4 RXD (out), 5 NC, 6 CANL (io), 7 CANH (io), 8 STBY (in), 9 EP

## Mount Hole
designator PTH?
footprint Mount_Hole
pins: 1

## NVMFS2D3P04M8LT1G
designator Q?
NVMFS2D3P04M8L Power MOSFET, Single, P-Channel, -40 V, 2.2 mΩ, -222 A; Manufacturer: ON Semiconductor; Supplier: Digikey; Supplier Part Number: 488-NVMFS2D3P04M8LT1GCT-ND; Manufacturer Part Number: NVMFS2D3P04M8LT1G; RoHS: No; Category: MOSFETs; Stock: 1068; Pricing: 1=3.24, 10=2.717, 100=2.1981, 500=1.9539 (USD)
footprint 8-PowerTDFN_5pin (8-PowerTDFN)
pins: 1 SOURCE, 2 SOURCE, 3 SOURCE, 4 GATE, 5 DRAIN, 6 DRAIN
text: 1, 2, 3; 5, 6

## PESD2USB3UX-TR
designator D?
ESD Suppressor Single Uni-Directional 3.3V 8kV 3-Pin SOT-23 T/R; Manufacturer: Nexperia; Datasheet Link: https://assets.nexperia.com/documents/data-sheet/PESD2USB3UX-T.pdf; Height: 1.1mm; Mouser Part Number: 771-PESD2USB3UX-TR; Mouser Price/Stock: https://www.mouser.co.uk/ProductDetail/Nexperia/PESD2USB3UX-TR?qs=sPbYRqrBIVm2kDSj6qa%252BFQ%3D%3D; Arrow Part Number: PESD2USB3UX-TR; Arrow Price/Stock: https://www.arrow.com/en/products/pesd2usb3ux-tr/nexperia?region=nac; Supplier: Digikey; Supplier Part Number: 1727-PESD2USB3UX-DKR-ND; Manufacturer Part Number: PESD2USB3UX-TR; RoHS: No; Category: TVS Diodes; Stock: 13602; Pricing: 1=0.46, 10=0.325, 100=0.1642, 500=0.13398, 1000=0.0994 (USD)
footprint SOT95P230X110-3N
pins: 1 CATHODE_(DIODE_1), 2 CATHODE_(DIODE_2), 3 COMMON_ANODE

## PI3WVR626XEBEX
designator *
2: 1 MIPI 2-Data Lane Switch 1.5V to 3.6V 24-Pin X1QFN T/R; Manufacturer: Diodes; Manufacturer Part Number: PI3WVR626XEBEX; Supplier: Digikey; Supplier Part Number: 31-PI3WVR626XEBEXDKR-ND; RoHS: Yes; Category: Integrated Circuits (ICs); Stock: 6384; Pricing: 1=0.9, 10=0.804, 25=0.7636, 100=0.6272, 250=0.58632, 500=0.51812, 1000=0.40905 (USD)
footprint QFN35P250X250X50-25N
pins: 1 CLKB-, 2 CLKA-, 3 CLKB+, 4 CLKA+, 5 ~{OE}, 6 CLK+, 7 CLK-, 8 D1+, 9 GND_1, 10 D1-, 11 D2+, 12 D2-, 13 SEL, 14 D2B-, 15 D2A-, 16 D2B+, 17 D2A+, 18 VDD, 19 D1B-, 20 D1A-, 21 GND_2, 22 D1B+, 23 D1A+, 24 GND_3, 25 EP

## SFW15R-1STE1LF
designator *
Conn FFC/FPC Connector SKT 15 POS 1mm Solder RA SMD Embossed T/R; Manufacturer: Amphenol ICC / FCI; Manufacturer Part Number: SFW15R-1STE1LF; Supplier: Digikey; Supplier Part Number: 609-1905-1-ND; RoHS: No; Category: FFC / FPC; Stock: 2554; Pricing: 1=0.66, 10=0.578, 25=0.528, 50=0.497, 100=0.4762, 250=0.4348, 500=0.4141, 1000=0.34163 (USD); ComponentLink1URL: https://datasheet.octopart.com/SFW15R-1STE1LF-Areva-datasheet-119238.pdf?src-supplier=Mouser; ComponentLink1Description: https://datasheet.octopart.com/SFW15R-1STE1LF-Areva-datasheet-119238.pdf?src-supplier=Mouser; ComponentLink2URL: http://portal.fciconnect.com/Comergent/fci/drawing/sfw12lf.pdf?src-supplier=Avnet; ComponentLink2Description: http://portal.fciconnect.com/Comergent/fci/drawing/sfw12lf.pdf?src-supplier=Avnet; ComponentLink3URL: https://cdn.amphenol-icc.com/media/wysiwyg/files/drawing/sfw12lf.pdf?src-supplier=Digikey; ComponentLink3Description: https://cdn.amphenol-icc.com/media/wysiwyg/files/drawing/sfw12lf.pdf?src-supplier=Digikey; ComponentLink4URL: http://portal.fciconnect.com/Comergent//fci/drawing/sfw12lf.pdf?src-supplier=Digikey; ComponentLink4Description: http://portal.fciconnect.com/Comergent//fci/drawing/sfw12lf.pdf?src-supplier=Digikey; ComponentLink5URL: http://components.arrow.com/part/dataview/41915029S8554886N8314?src-supplier=Arrow+Electronics; ComponentLink5Description: http://components.arrow.com/part/dataview/41915029S8554886N8314?src-supplier=Arrow+Electronics
footprint SFW15R1STE1LF
pins: 1, 2, 3, 4, 5, 6, 7, 8, 9, 10, 11, 12, 13, 14, 15, MP1, MP2

## SIT1602BC-32-YYS-10.000000
designator *
Low Power, Standard Frequency MEMS Oscillator; Manufacturer: SiTime; Manufacturer Part Number: SIT1602BC-32-YYS-10.000000; Supplier: Digikey; Supplier Part Number: 1473-SIT1602BC-32-YYS-10.000000-ND; RoHS: No; Category: Oscillators; Pricing: 1=1.47, 10=1.401, 50=1.3688, 100=1.1733, 500=1.1407, 1000=0.96144, 2500=0.91255, 5000=0.87996, 10000=0.84737 (USD)
footprint SIT1602BC-32-YYS-10.000000
pins: 1 STBY (in), 2 GND (power), 3 OUT (out), 4 VCC (power)

## SMAJ30CA
designator D?
LITTELFUSE - SMAJ30CA - TVS DIODE, 400W, 30V, DO-214AC; Manufacturer: Littelfuse Inc.; Clamping Voltage: 48.4V; Polarity: Bidirectional; Peak Pulse Current: 8.3A; Test Current: 1mA; Reverse Breakdown Voltage: 33.3V; Number of Elements: 1; Leakage Current: 1uA; Element Configuration: Single; Power Line Protection: No; Max Power Dissipation: 3.3W; Max Breakdown Voltage: 36.8V; Manufacturer Part Number: SMAJ30CA; Value: *; Supplier 1: Digi-Key; Stock 1: 28360; Pricing 1: 1=0.45000, 10=0.33900, 25=0.30520, 100=0.16100, 250=0.15928, 500=0.14264, 1000=0.11100, 2500=0.10156 (USD); RoHS: Yes; Mount: Surface Mount; Number of Pins: 2; Min Operating Temperature: -65°C; Max Operating Temperature: 150°C; Peak Pulse Power: 400W; Packaging: Tape and Reel; Reverse Standoff Voltage: 30V; Breakdown Voltage: 33.3V; Package Quantity: 5000; Max Surge Current: 8.3A; Operating Supply Voltage: 30V; Min Breakdown Voltage: 33.3V; Number of Channels: 1; Direction: Bidirectional; Termination: SMD/SMT; Max Reverse Leakage Current: 1uA; Number of Bidirectional Channels: 1; Composition: Zener; Power Dissipation: 400W; Voltage Rating (DC): 30V; Length: 4.5mm; Height: 2.087mm; Width: 2.79mm; Radiation Hardening: No; Lead Free: Lead Free; REACH SVHC: No SVHC; ComponentLink1URL: https://datasheet.ciiva.com/25624/0900766b810f4edb-25624835.pdf?src-supplier=RSComponents; ComponentLink1Description: https://datasheet.ciiva.com/25624/0900766b810f4edb-25624835.pdf?src-supplier=RSComponents; ComponentLink2URL: https://datasheet.ciiva.com/331/littelfuse-tvs-diode-smaj-datasheet-pdf-331093.pdf?src-supplier=Digi-Key; ComponentLink2Description: https://datasheet.ciiva.com/331/littelfuse-tvs-diode-smaj-datasheet-pdf-331093.pdf?src-supplier=Digi-Key; ComponentLink3URL: https://datasheet.ciiva.com/28473/607617-28473413.pdf?src-supplier=Element14; ComponentLink3Description: https://datasheet.ciiva.com/28473/607617-28473413.pdf?src-supplier=Element14; ComponentLink4URL: https://datasheet.ciiva.com/331/littelfuse-tvs-diode-smaj-datasheet-pdf-331094.pdf?src-supplier=Digi-Key; ComponentLink4Description: https://datasheet.ciiva.com/331/littelfuse-tvs-diode-smaj-datasheet-pdf-331094.pdf?src-supplier=Digi-Key; ComponentLink5URL: https://datasheet.ciiva.com/331/littelfuse-tvs-diode-smaj-datasheet-pdf-331095.pdf?src-supplier=Digi-Key; ComponentLink5Description: https://datasheet.ciiva.com/331/littelfuse-tvs-diode-smaj-datasheet-pdf-331095.pdf?src-supplier=Digi-Key; ComponentLink6URL: https://datasheet.ciiva.com/14162/smaj-eng-ds-14162037.pdf?src-supplier=Distrelec; ComponentLink6Description: https://datasheet.ciiva.com/14162/smaj-eng-ds-14162037.pdf?src-supplier=Distrelec; ComponentLink7URL: https://datasheet.ciiva.com/16487/littelfuse-tvs-diode-smaj-16487781.pdf?src-supplier=Future+Electronics; ComponentLink7Description: https://datasheet.ciiva.com/16487/littelfuse-tvs-diode-smaj-16487781.pdf?src-supplier=Future+Electronics; ComponentLink8URL: https://datasheet.ciiva.com/8062/littelfuse-tvs-diode-smaj-8062300.pdf?src-supplier=Element14; ComponentLink8Description: https://datasheet.ciiva.com/8062/littelfuse-tvs-diode-smaj-8062300.pdf?src-supplier=Element14; Supplier Part Number 1: SMAJ30CALFCT-ND
footprint DO-214AC-M (DO-214AC-Medium density)
pins: 1, 2

## SML-LX0805GC-TR
designator PWR?, comment Green
LED GREEN CLEAR SMD; Part Number: SML-LX0805GC-TR; Manufacturer: Lumex Opto/Components Inc.; Configuration: Standard; Current - Test: 20mA; Lens Color: Colorless; Lens Size: 1.40mm x 1.25mm; Lens Style: Rectangle with Flat Top; Millicandela Rating: 10mcd; Viewing Angle: 140°; Voltage - Forward (Vf) (Typ): 2.2V; Wavelength - Peak: 565nm; Color: Green; ComponentLink1Description: Datasheet; ComponentLink1URL: https://www.lumex.com/content/files/ProductAttachment/SML-LX0805GC-TR.pdf; ComponentLink2Description: DigiKey Link; ComponentLink2URL: https://www.digikey.com/en/products/detail/lumex-opto-components-inc/SML-LX0805GC-TR/515786; Device Package: 0805 (2012 Metric); Height (Max): 1.20mm; LastUpdated: 11/03/2024 07:52:46; Lens Transparency: Clear; Lifecycle Status: Active; Minimum Order: 1; Mounting Type: Surface Mount; Package / Case: 0805 (2012 Metric); Packaging: TapeAndReel; PartId: 242; Part Status: Active; Price: 0.05; Series: -; Size / Dimension: 2.00mm L x 1.25mm W; Supplier 1: DigiKey; Supplier Part Number 1: 67-2188-1-ND; Value: Green
footprint LED 0805_2012 GREEN (Chip Diode, 2-Leads, Body 2.00x1.25mm, IPC Medium Density)
pins: 1, 2

## SRF3216-601Y
designator L?
BOURNS - SRF3216A-601Y - FILTER, COMMON MODE, 600R, 0.3A, SMD; Manufacturer: Bourns Inc.; Number of Lines: 2; Max Current Rating: 300mA; DC Resistance (DCR): 800mR; Voltage Rating (DC): 50V; Manufacturer Part Number: SRF3216-601Y; Supplier 1: Digi-Key; Stock 1: 1132; Pricing 1: 1=0.78, 10=0.684, 100=0.4888, 500=0.41056, 1000=0.33235 (USD); Mount: Surface Mount; Min Operating Temperature: -40°C; Max Operating Temperature: 125°C; Resistance: 600R; Package Quantity: 2000; Packaging: Tape and Reel; Impedance: 600R; Current Rating: 300mA; Length: 0.126inch; Height: 0.087inch; Width: 0.063inch; REACH SVHC: No SVHC; ComponentLink1URL: http://www.farnell.com/datasheets/2360565.pdf?src-supplier=Farnell; ComponentLink1Description: http://www.farnell.com/datasheets/2360565.pdf?src-supplier=Farnell; ComponentLink2URL: https://media.digikey.com/pdf/Data%20Sheets/Bourns%20PDFs/SRF3216A_Series_DS.pdf?src-supplier=Digi-Key; ComponentLink2Description: https://media.digikey.com/pdf/Data%20Sheets/Bourns%20PDFs/SRF3216A_Series_DS.pdf?src-supplier=Digi-Key; ComponentLink3URL: http://www.farnell.com/datasheets/1955469.pdf?src-supplier=Element14; ComponentLink3Description: http://www.farnell.com/datasheets/1955469.pdf?src-supplier=Element14; Supplier Part Number 1: SRF3216A-601YDKR-ND
footprint SRF3216A (Common Mode Chip Inductors)
pins: 1, 2, 3, 4

## SRP6540-390M
designator L?
Inductor Power Shielded/Molded Wirewound 39uH 20% 100KHz Powdered Iron 1.8A 0.322Ohm DCR T/R; Manufacturer: Bourns; ComponentLink1URL: https://datasheet.ciiva.com/22667/1698468-22667152.pdf?src-supplier=Element14; ComponentLink1Description: https://datasheet.ciiva.com/22667/1698468-22667152.pdf?src-supplier=Element14; Value: 39uH; Supplier: Digikey; Supplier Part Number: SRP6540-390MDKR-ND; Manufacturer Part Number: SRP6540-390M; RoHS: Yes; Category: Fixed Inductors; Stock: 3209; Pricing: 1=1.09, 10=0.93, 25=0.8568, 50=0.7656, 100=0.6419 (USD); ComponentLink2URL: https://datasheet.ciiva.com/28679/1698468-28679581.pdf?src-supplier=Element14; ComponentLink2Description: https://datasheet.ciiva.com/28679/1698468-28679581.pdf?src-supplier=Element14; ComponentLink3URL: https://datasheet.ciiva.com/22667/1698468-22667150.pdf?src-supplier=Element14; ComponentLink3Description: https://datasheet.ciiva.com/22667/1698468-22667150.pdf?src-supplier=Element14; ComponentLink4URL: https://datasheet.ciiva.com/15027/srp6540-15027231.pdf?src-supplier=Digikey; ComponentLink4Description: https://datasheet.ciiva.com/15027/srp6540-15027231.pdf?src-supplier=Digikey
footprint FP-SRP6540-MFG
pins: 1, 2

## SRP6540-470M
designator L?
Inductor Power Shielded/Molded Wirewound 47uH 20% 100KHz Powdered Iron 1.6A 366mOhm DCR T/R; Manufacturer: Bourns; Supplier: Digikey; Supplier Part Number: SRP6540-470MCT-ND; Manufacturer Part Number: SRP6540-470M; RoHS: Yes; Category: Fixed Inductors; Stock: 5809; Pricing: 1=1.09, 10=0.93, 25=0.8568, 50=0.7656, 100=0.6419 (USD); ComponentLink1URL: https://datasheet.ciiva.com/22667/1698468-22667152.pdf?src-supplier=Element14; ComponentLink1Description: https://datasheet.ciiva.com/22667/1698468-22667152.pdf?src-supplier=Element14; Value: 47uH
footprint FP-SRP6540-MFG
pins: 1, 2

## STM32G431RBT6
designator U?
Integrated Circuit; Manufacturer_Name: STMicroelectronics; Datasheet Link: https://pl.mouser.com/datasheet/2/389/stm32g431c6-1600866.pdf; Height: 1.6mm; Manufacturer Part Number: STM32G431RBT6; Mouser Part Number: 511-STM32G431RBT6; Mouser Price/Stock: https://www.mouser.co.uk/ProductDetail/STMicroelectronics/STM32G431RBT6?qs=T3oQrply3y8GpSwPjv1GMg%3D%3D; Arrow Part Number: STM32G431RBT6; Arrow Price/Stock: https://www.arrow.com/en/products/stm32g431rbt6/stmicroelectronics?region=nac
footprint QFP50P1200X1200X160-64N
part A pins: 2 PC13, 3 PC14-OSC32_IN, 4 PC15-OSC32_OUT, 5 PF0-OSC_IN, 6 PF1-OSC_OUT, 7 PG10-NRST, 8 PC0, 9 PC1, 10 PC2, 11 PC3, 12 PA0, 13 PA1, 14 PA2, 17 PA3, 18 PA4, 19 PA5, 20 PA6, 21 PA7, 22 PC4, 23 PC5, 24 PB0, 25 PB1, 26 PB2, 30 PB10, 33 PB11, 34 PB12, 35 PB13, 36 PB14, 37 PB15, 38 PC6, 39 PC7, 40 PC8, 41 PC9, 42 PA8, 43 PA9, 44 PA10, 45 PA11, 46 PA12, 49 PA13, 50 PA14, 51 PA15, 52 PC10, 53 PC11, 54 PC12, 55 PD2, 56 PB3, 57 PB4, 58 PB5, 59 PB6, 60 PB7, 61 PB8-BOOT0, 62 PB9
part B pins: 1 VBAT, 15 VSS_1, 16 VDD_1, 27 VSSA, 28 VREF+, 29 VDDA, 31 VSS_2, 32 VDD_2, 47 VSS_3, 48 VDD_3, 63 VSS_4, 64 VDD_4
part A text: MCU IOs; MCU CLK & RST

## THVD1420DRLR
designator U?
3.3-V to 5-V, 12-Mbps, RS-485 transceiver in small package option with ±12-kV IEC ESD prot 8-SOT-5X3 -40 to 125; Manufacturer: Texas Instruments; Supplier: Mouser; Supplier Part Number: 595-THVD1420DRLR; Manufacturer Part Number: THVD1420DRLR; RoHS: No; Category: Integrated Circuits (ICs); Stock: 1020; Pricing: 1=1.35, 10=1.21, 50=1.21, 100=0.938, 1000=0.612, 10000=0.521 (USD); Pins: 8NUMBER; Length: 2.1mm; Width: 1.2mm; Height: 600um; Thickness: 550um
footprint FP-DRL0008A-MFG
pins: 1 R, 2 ~{RE}, 3 DE, 4 D, 5 GND, 6 A, 7 B, 8 VCC

## USBLC6-2SC6
designator U?
ESD Suppressor Diode Arrays Uni-Dir 15kV@Air Gap/8kV@Contact Disc 6-Pin SOT-23 T/R; Manufacturer: STMicroelectronics; Operating Supply Voltage: 1.1V; Direction: Unidirectional,Bidirectional; Value: 3.5pF; Number of Channels: 2; Breakdown Voltage: 6V; Clamping Voltage: 17V; Reverse Standoff Voltage: 5.25V; Power Line Protection: Yes; Test Current: 1mA; Max Reverse Leakage Current: 150nA; Peak Pulse Current: 5A; Data Rate: 480Mbps; Number of Elements: 1; Working Voltage: 5V; Supplier: Digikey; Supplier Part Number: 497-5235-1-ND; Manufacturer Part Number: USBLC6-2SC6; RoHS: Yes; Category: TVS Diodes; Stock: 28823; Pricing: 1=0.35, 10=0.273, 100=0.1636, 500=0.1515, 1000=0.10302 (USD); Mounting Technology: Surface Mount; Case/Package: SOT-23; Pins: 6; Min Operating Temperature: -40°C; Max Operating Temperature: 125°C; Packaging: Tape and Reel; Package Quantity: 3000; Termination: SMD/SMT; Number of Bidirectional Channels: 2; Min Breakdown Voltage: 6V; ESD Protection: Yes; Leakage Current: 150nA; Series: USB; Reverse Breakdown Voltage: 6V; Polarity: Unidirectional,Bidirectional; Max Breakdown Voltage: 6V; Clamping Voltage-Max: 17V; Max Repetitive Reverse Voltage (Vrrm): 5.25V; Length: 3.05mm; Width: 1.75mm; Height: 1.3mm; Depth: 1.75mm; Radiation Hardening: No; Lead Free: Lead Free; Reach SVHC Compliant: No; RoHS Compliant: Yes; ComponentLink1URL: https://datasheet.ciiva.com/1268/1690354-1268384.pdf?src-supplier=Element14; ComponentLink1Description: https://datasheet.ciiva.com/1268/1690354-1268384.pdf?src-supplier=Element14; ComponentLink2URL: https://datasheet.ciiva.com/4508/cd00050750-113117-4508433.pdf?src-supplier=Mouser; ComponentLink2Description: https://datasheet.ciiva.com/4508/cd00050750-113117-4508433.pdf?src-supplier=Mouser; ComponentLink3URL: https://datasheet.ciiva.com/15143/getdatasheetpartid-148465-15143789.pdf?src-supplier=Verical; ComponentLink3Description: https://datasheet.ciiva.com/15143/getdatasheetpartid-148465-15143789.pdf?src-supplier=Verical; ComponentLink4URL: https://datasheet.ciiva.com/16200/cd00050750-16200026.pdf?src-supplier=Future+Electronics; ComponentLink4Description: https://datasheet.ciiva.com/16200/cd00050750-16200026.pdf?src-supplier=Future+Electronics; ComponentLink5URL: https://datasheet.ciiva.com/41444/001184109-da-01-en-ic-esd-protecti-usblc6-2sc6-sot-23-6-stm-41444156.pdf?src-supplier=Conrad; ComponentLink5Description: https://datasheet.ciiva.com/41444/001184109-da-01-en-ic-esd-protecti-usblc6-2sc6-sot-23-6-stm-41444156.pdf?src-supplier=Conrad
footprint SOT95P280X145-6N
pins: 1 I/O1_IN (io), 2 GND (power), 3 I/O2_IN (io), 4 I/O2_OUT (io), 5 VBUS (power), 6 I/O1_OUT (io)

## VOM617A-6T
designator U?
Optocoupler DC-IN 1-CH Transistor DC-OUT 4-Pin SOP T/R; Manufacturer: Vishay; Reverse Breakdown Voltage: 6V; Forward Voltage: 1.6V; Forward Current: 60mA; Number of Elements: 1; Power Dissipation: 170mW; Collector Emitter Saturation Voltage: 400mV; Collector Emitter Voltage (VCEO): 80V; Datasheet Link: https://www.mouser.in/datasheet/2/427/vom617a-1767067.pdf; Height: 2.4mm; Manufacturer Part Number: VOM617A-6T; Mouser Part Number: 78-VOM617A-6T; Mouser Price/Stock: https://www.mouser.co.uk/ProductDetail/Vishay-Semiconductors/VOM617A-6T?qs=Q7nJoqLg%252BZjUtHi4vzvLqw%3D%3D; Arrow Part Number: VOM617A-6T; Arrow Price/Stock: https://www.arrow.com/en/products/vom617a-6t/vishay?region=nac; Supplier: Digikey; Supplier Part Number: 751-VOM617A-6TCT-ND; RoHS: Yes; Category: Optocouplers; Stock: 8550; Pricing: 1=0.62, 10=0.384, 100=0.2207, 1000=0.17271 (USD); Mounting Technology: Surface Mount; Case/Package: SOP; Pins: 4; Min Operating Temperature: -55°C; Max Operating Temperature: 110°C; Packaging: Tape and Reel; RoHS Compliant: Yes
footprint SOP254P675X240-4N
pins: 1 A, 2 C_1, 3 E, 4 C_2